# Altium footprint library TitansLib.PcbLib: 333 footprints (part 3 of 21)
Each footprint in its own frame and in the unit in brackets; x right, y up, seen from the top. Pads: shape width x height; smd on the part's side, far side on the other; paste and mask are expansions set on the pad; w line width, h text height; cw(c..) or ccw(c..) is an arc to the next point about the centre after c.
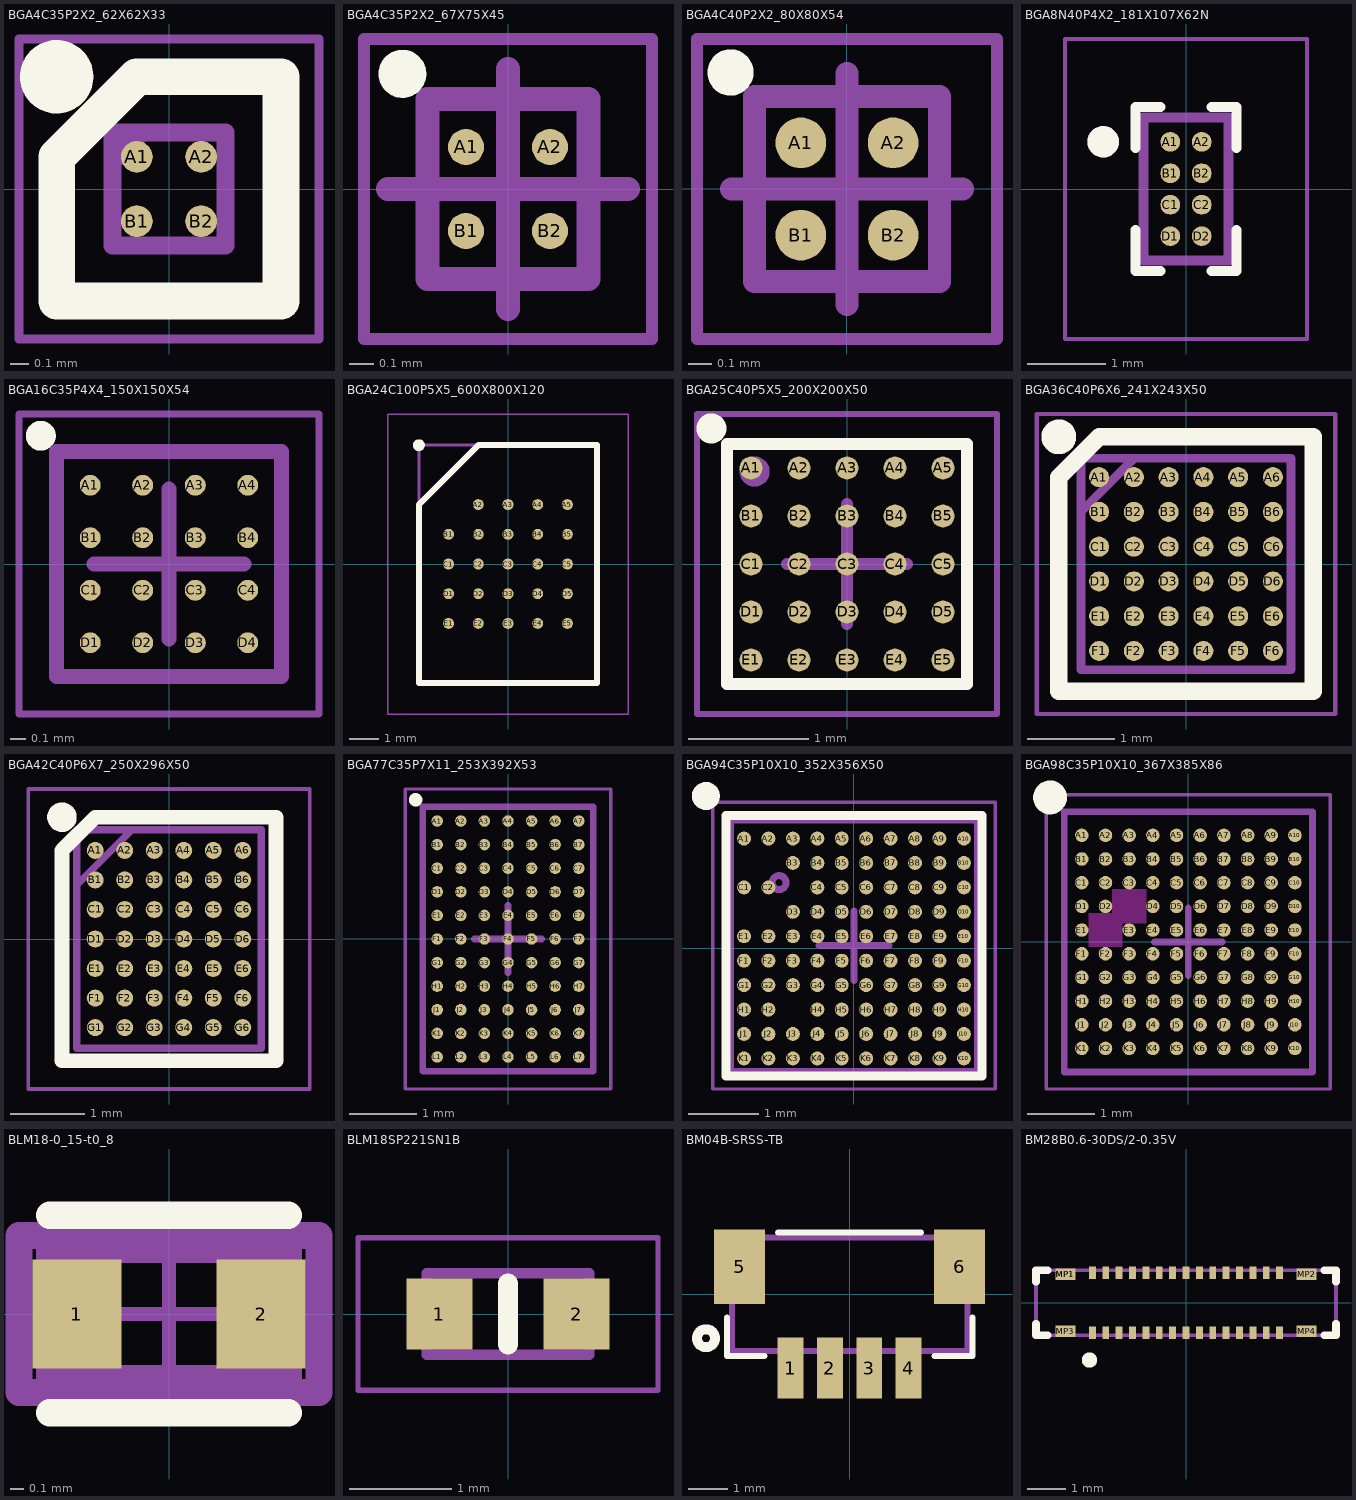
[diagram p2: the footprints below, top view; thin cyan lines are the x and y axes]

## BGA4C35P2X2_62X62X33 [mm]
pads (4):
  round 0.173 smd: A1(-0.175,0.175) A2(0.175,0.175) B1(-0.175,-0.175) B2(0.175,-0.175)
Top Overlay:
  circle w0.2: c-0.612,0.612 r0.1
  lines w0.2: -0.176,0.611 -0.612,0.175 -0.612,-0.611 0.611,-0.611 0.611,0.612 -0.175,0.612
Bottom Assembly:
  lines w0.05: -0.818,-0.818 0.818,-0.818 0.818,0.818 -0.818,0.818 -0.818,-0.818
Mechanical 15:
  lines w0.1: -0.308,0.149 -0.149,0.308 ; -0.308,-0.308 0.308,-0.308 0.308,0.308 -0.308,0.308 -0.308,-0.308

## BGA4C35P2X2_67X75X45 [mm] "BGA, 4-Leads, Body 0.67x0.75mmx0.45mm, Pitch 0.35mm"
height 0.45
pads (4):
  round 0.15 smd mask+0.05: A1(-0.175,0.175) A2(0.175,0.175) B1(-0.175,-0.175) B2(0.175,-0.175)
Top Overlay:
  circle w0.1: c-0.44,0.48 r0.05
Top Courtyard:
  lines w0.05: -0.6,-0.625 -0.6,0.625 0.6,0.625 0.6,-0.625 -0.6,-0.625
  lines w0.1: -0.5,0 0.5,0 ; 0,-0.5 0,0.5
Top Assembly:
  lines w0.1: -0.335,-0.375 -0.335,0.375 0.335,0.375 0.335,-0.375 -0.335,-0.375
3D body "BGA4C35P2X2_67X75X45.step": height 0.45, standoff 0, extent -0.335,-0.375 0.335,0.375

## BGA4C40P2X2_80X80X54 [mm] "BGA, 4-Leads, Body 0.80x0.80mmx0.54mm, Pitch 0.40mm"
height 0.54
pads (4):
  round 0.22 smd mask+0.05: A1(-0.2,0.2) A2(0.2,0.2) B1(-0.2,-0.2) B2(0.2,-0.2)
Top Overlay:
  circle w0.1: c-0.505,0.505 r0.05
Mechanical 13:
  lines w0.1: -0.4,-0.4 0.4,-0.4 0.4,0.4 -0.4,0.4 -0.4,-0.4
Mechanical 15:
  lines w0.05: -0.65,-0.65 0.65,-0.65 0.65,0.65 -0.65,0.65 -0.65,-0.65
  lines w0.1: -0.5,0 0.5,0 ; 0,-0.5 0,0.5
3D body "BGA4C40P2X2_80X80X54_.step": height 0.54, standoff 0, extent -0.4,-0.4 0.4,0.4

## BGA8N40P4X2_181X107X62N [mm]
pads (8):
  round 0.25 smd: A1(-0.2,0.6) A2(0.2,0.6) B1(-0.2,0.2) B2(0.2,0.2) C1(-0.2,-0.2) C2(0.2,-0.2) D1(-0.2,-0.6) D2(0.2,-0.6)
Top Overlay:
  circle w0.2: c-1.053,0.6 r0.1
  lines w0.127: -0.645,-0.523 -0.645,-1.045 -0.323,-1.045 ; -0.645,0.523 -0.645,1.045 -0.323,1.045 ; 0.323,-1.045 0.645,-1.045 0.645,-0.523 ; 0.323,1.045 0.645,1.045 0.645,0.523
Mechanical 13:
  circle w0.2: c-1.053,0.6 r0.1
  lines w0.127: -0.538,-0.907 0.538,-0.907 0.538,0.907 -0.538,0.907 -0.538,-0.907
Mechanical 15:
  lines w0.05: -1.538,-1.907 1.538,-1.907 1.538,1.907 -1.538,1.907 -1.538,-1.907

## BGA16C35P4X4_150X150X54 [mm] "BGA, 16-Leads, Body 1.50x1.50mmx0.54mm, Pitch 0.35mm"
height 0.54
pads (16):
  round 0.14 smd mask+0.05: A1(-0.525,0.525) A2(-0.175,0.525) A3(0.175,0.525) A4(0.525,0.525) B1(-0.525,0.175) B2(-0.175,0.175) B3(0.175,0.175) B4(0.525,0.175) C1(-0.525,-0.175) C2(-0.175,-0.175) C3(0.175,-0.175) C4(0.525,-0.175) D1(-0.525,-0.525) D2(-0.175,-0.525) D3(0.175,-0.525) D4(0.525,-0.525)
Top Overlay:
  circle w0.1: c-0.855,0.855 r0.05
Top Courtyard:
  lines w0.05: -1,-1 -1,1 1,1 1,-1 -1,-1
  lines w0.1: -0.5,0 0.5,0 ; 0,-0.5 0,0.5
Top Assembly:
  lines w0.1: -0.75,-0.75 -0.75,0.75 0.75,0.75 0.75,-0.75 -0.75,-0.75
3D body "BGA16C35P4X4_150X150X54.step": height 0.54, standoff 0, extent -0.75,-0.75 0.75,0.75

## BGA24C100P5X5_600X800X120 [mm]
pads (24):
  round 0.37 smd: A2(-1,2) A3(0,2) A4(1,2) A5(2,2) B1(-2,1) B2(-1,1) B3(0,1) B4(1,1) B5(2,1) C1(-2,0) C2(-1,0) C3(0,0) C4(1,0) C5(2,0) D1(-2,-1) D2(-1,-1) D3(0,-1) D4(1,-1) D5(2,-1) E1(-2,-2) E2(-1,-2) E3(0,-2) E4(1,-2) E5(2,-2)
Top Overlay:
  circle w0.2: c-3,4 r0.1
  lines w0.2: -3,-4 -3,2 -1,4 3,4 3,-4 -3,-4
Bottom Assembly:
  lines w0.05: -4.05,-5.05 -4.05,5.05 4.05,5.05 4.05,-5.05 -4.05,-5.05
Mechanical 15:
  lines w0.1: -3,1.975 -0.975,4 ; -3,-4 -3,4 3,4 3,-4 -3,-4
3D body "APS51208N-OBR-BD.stp": height 1.2, standoff 0, extent -3,-4 3,4

## BGA25C40P5X5_200X200X50 [mm]
pads (25):
  round 0.193 smd mask+0.05: A1(-0.8,0.8) A2(-0.4,0.8) A3(0,0.8) A4(0.4,0.8) A5(0.8,0.8) B1(-0.8,0.4) B2(-0.4,0.4) B3(0,0.4) B4(0.4,0.4) B5(0.8,0.4) C1(-0.8,0) C2(-0.4,0) C3(0,0) C4(0.4,0) C5(0.8,0) D1(-0.8,-0.4) D2(-0.4,-0.4) D3(0,-0.4) D4(0.4,-0.4) D5(0.8,-0.4) E1(-0.8,-0.8) E2(-0.4,-0.8) E3(0,-0.8) E4(0.4,-0.8) E5(0.8,-0.8)
Top Overlay:
  circle w0.15: c-1.13,1.13 r0.05
  lines w0.1: -1,-1 1,-1 1,1 -1,1 -1,-1
Mechanical 7:
  circle w0.15: c-0.77,0.77 r0.05
  lines w0.1: -1,-1 -1,1 1,1 1,-1 -1,-1
Mechanical 15:
  lines w0.05: -1.25,-1.25 1.25,-1.25 1.25,1.25 -1.25,1.25 -1.25,-1.25
  lines w0.1: -0.5,0 0.5,0 ; 0,-0.5 0,0.5
3D body "BGA25C40P5X5_200X200X50.step": height 0.5, standoff 0, extent -1,-1 1,1

## BGA36C40P6X6_241X243X50 [mm]
pads (36):
  round 0.23 smd mask+0.05: A1(-1,1) A2(-0.6,1) A3(-0.2,1) A4(0.2,1) A5(0.6,1) A6(1,1) B1(-1,0.6) B2(-0.6,0.6) B3(-0.2,0.6) B4(0.2,0.6) B5(0.6,0.6) B6(1,0.6) C1(-1,0.2) C2(-0.6,0.2) C3(-0.2,0.2) C4(0.2,0.2) C5(0.6,0.2) C6(1,0.2) D1(-1,-0.2) D2(-0.6,-0.2) D3(-0.2,-0.2) D4(0.2,-0.2) D5(0.6,-0.2) D6(1,-0.2) E1(-1,-0.6) E2(-0.6,-0.6) E3(-0.2,-0.6) E4(0.2,-0.6) E5(0.6,-0.6) E6(1,-0.6) F1(-1,-1) F2(-0.6,-1) F3(-0.2,-1) F4(0.2,-1) F5(0.6,-1) F6(1,-1)
Top Overlay:
  circle w0.2: c-1.463,1.463 r0.1
  lines w0.2: -1.463,-1.463 -1.463,1 -1,1.463 1.463,1.463 1.463,-1.463 -1.463,-1.463
Top Courtyard:
  lines w0.05: -1.717,-1.725 -1.717,1.726 1.717,1.726 1.717,-1.725 -1.717,-1.725
Mechanical 15:
  lines w0.1: -1.207,0.603 -0.594,1.216 ; -1.207,-1.215 -1.207,1.216 1.207,1.216 1.207,-1.215 -1.207,-1.215
3D body "TAS2562YFPR.stp": height 0.5, standoff 0, extent -1.208,-1.215 1.206,1.216

## BGA42C40P6X7_250X296X50 [mm]
pads (42):
  round 0.23 smd mask+0.05: A1(-1,1.2) A2(-0.6,1.2) A3(-0.2,1.2) A4(0.2,1.2) A5(0.6,1.2) A6(1,1.2) B1(-1,0.8) B2(-0.6,0.8) B3(-0.2,0.8) B4(0.2,0.8) B5(0.6,0.8) B6(1,0.8) C1(-1,0.4) C2(-0.6,0.4) C3(-0.2,0.4) C4(0.2,0.4) C5(0.6,0.4) C6(1,0.4) D1(-1,0) D2(-0.6,0) D3(-0.2,0) D4(0.2,0) D5(0.6,0) D6(1,0) E1(-1,-0.4) E2(-0.6,-0.4) E3(-0.2,-0.4) E4(0.2,-0.4) E5(0.6,-0.4) E6(1,-0.4) F1(-1,-0.8) F2(-0.6,-0.8) F3(-0.2,-0.8) F4(0.2,-0.8) F5(0.6,-0.8) F6(1,-0.8) G1(-1,-1.2) G2(-0.6,-1.2) G3(-0.2,-1.2) G4(0.2,-1.2) G5(0.6,-1.2) G6(1,-1.2)
Top Overlay:
  circle w0.2: c-1.45,1.65 r0.1
  lines w0.2: -1.45,-1.65 -1.45,1.2 -1,1.65 1.45,1.65 1.45,-1.65 -1.45,-1.65
Top Courtyard:
  lines w0.05: -1.905,-2.032 1.905,-2.032 1.905,2.032 -1.905,2.032 -1.905,-2.032
Mechanical 15:
  lines w0.1: -1.249,0.732 -0.502,1.479 ; -1.249,-1.479 -1.249,1.478 1.249,1.478 1.249,-1.479 -1.249,-1.479
3D body "TAS2563YBGR.stp": height 0.5, standoff 0, extent -1.249,-1.479 1.249,1.479

## BGA77C35P7X11_253X392X53 [mm] "BGA, 77-Leads, Body 2.53x3.92mmx0.53mm, Pitch 0.35mm"
height 0.53
pads (77):
  round 0.17 smd mask+0.05: A1(-1.05,1.75) A2(-0.7,1.75) A3(-0.35,1.75) A4(0,1.75) A5(0.35,1.75) A6(0.7,1.75) A7(1.05,1.75) B1(-1.05,1.4) B2(-0.7,1.4) B3(-0.35,1.4) B4(0,1.4) B5(0.35,1.4) B6(0.7,1.4) B7(1.05,1.4) C1(-1.05,1.05) C2(-0.7,1.05) C3(-0.35,1.05) C4(0,1.05) C5(0.35,1.05) C6(0.7,1.05) C7(1.05,1.05) D1(-1.05,0.7) D2(-0.7,0.7) D3(-0.35,0.7) D4(0,0.7) D5(0.35,0.7) D6(0.7,0.7) D7(1.05,0.7) E1(-1.05,0.35) E2(-0.7,0.35) E3(-0.35,0.35) E4(0,0.35) E5(0.35,0.35) E6(0.7,0.35) E7(1.05,0.35) F1(-1.05,0) F2(-0.7,0) F3(-0.35,0) F4(0,0) F5(0.35,0) F6(0.7,0) F7(1.05,0) G1(-1.05,-0.35) G2(-0.7,-0.35) G3(-0.35,-0.35) G4(0,-0.35) G5(0.35,-0.35) G6(0.7,-0.35) G7(1.05,-0.35) H1(-1.05,-0.7) H2(-0.7,-0.7) H3(-0.35,-0.7) H4(0,-0.7) H5(0.35,-0.7) H6(0.7,-0.7) H7(1.05,-0.7) J1(-1.05,-1.05) J2(-0.7,-1.05) J3(-0.35,-1.05) J4(0,-1.05) J5(0.35,-1.05) J6(0.7,-1.05) J7(1.05,-1.05) K1(-1.05,-1.4) K2(-0.7,-1.4) K3(-0.35,-1.4) K4(0,-1.4) K5(0.35,-1.4) K6(0.7,-1.4) K7(1.05,-1.4) L1(-1.05,-1.75) L2(-0.7,-1.75) L3(-0.35,-1.75) L4(0,-1.75) L5(0.35,-1.75) L6(0.7,-1.75) L7(1.05,-1.75)
Top Overlay:
  circle w0.1: c-1.37,2.065 r0.05
Mechanical 13:
  lines w0.1: -1.265,-1.96 1.265,-1.96 1.265,1.96 -1.265,1.96 -1.265,-1.96
Mechanical 15:
  lines w0.05: -1.525,-2.225 1.525,-2.225 1.525,2.225 -1.525,2.225 -1.525,-2.225
  lines w0.1: -0.5,0 0.5,0 ; 0,-0.5 0,0.5
3D body "BGA77C35P7X11_253X392X53.step": height 0.53, standoff 0, extent -1.265,-1.96 1.265,1.96

## BGA94C35P10X10_352X356X50 [mm]
pads (94):
  round 0.2 smd mask+0.04: A1(-1.575,1.575) A2(-1.225,1.575) A3(-0.875,1.575) A4(-0.525,1.575) A5(-0.175,1.575) A6(0.175,1.575) A7(0.525,1.575) A8(0.875,1.575) A9(1.225,1.575) A10(1.575,1.575) B3(-0.875,1.225) B4(-0.525,1.225) B5(-0.175,1.225) B6(0.175,1.225) B7(0.525,1.225) B8(0.875,1.225) B9(1.225,1.225) B10(1.575,1.225) C1(-1.575,0.875) C2(-1.225,0.875) C4(-0.525,0.875) C5(-0.175,0.875) C6(0.175,0.875) C7(0.525,0.875) C8(0.875,0.875) C9(1.225,0.875) C10(1.575,0.875) D3(-0.875,0.525) D4(-0.525,0.525) D5(-0.175,0.525) D6(0.175,0.525) D7(0.525,0.525) D8(0.875,0.525) D9(1.225,0.525) D10(1.575,0.525) E1(-1.575,0.175) E2(-1.225,0.175) E3(-0.875,0.175) E4(-0.525,0.175) E5(-0.175,0.175) E6(0.175,0.175) E7(0.525,0.175) E8(0.875,0.175) E9(1.225,0.175) E10(1.575,0.175) F1(-1.575,-0.175) F2(-1.225,-0.175) F3(-0.875,-0.175) F4(-0.525,-0.175) F5(-0.175,-0.175) F6(0.175,-0.175) F7(0.525,-0.175) F8(0.875,-0.175) F9(1.225,-0.175) F10(1.575,-0.175) G1(-1.575,-0.525) G2(-1.225,-0.525) G3(-0.875,-0.525) G4(-0.525,-0.525) G5(-0.175,-0.525) G6(0.175,-0.525) G7(0.525,-0.525) G8(0.875,-0.525) G9(1.225,-0.525) G10(1.575,-0.525) H1(-1.575,-0.875) H2(-1.225,-0.875) H4(-0.525,-0.875) H5(-0.175,-0.875) H6(0.175,-0.875) H7(0.525,-0.875) H8(0.875,-0.875) H9(1.225,-0.875) H10(1.575,-0.875) J1(-1.575,-1.225) J2(-1.225,-1.225) J3(-0.875,-1.225) J4(-0.525,-1.225) J5(-0.175,-1.225) J6(0.175,-1.225) J7(0.525,-1.225) J8(0.875,-1.225) J9(1.225,-1.225) J10(1.575,-1.225) K1(-1.575,-1.575) K2(-1.225,-1.575) K3(-0.875,-1.575) K4(-0.525,-1.575) K5(-0.175,-1.575) K6(0.175,-1.575) K7(0.525,-1.575) K8(0.875,-1.575) K9(1.225,-1.575) K10(1.575,-1.575)
Top Overlay:
  circle w0.2: c-2.122,2.184 r0.1
  lines w0.125: -1.834,-1.826 1.835,-1.826 1.835,1.906 -1.834,1.906 -1.834,-1.826
Mechanical 7:
  circle w0.1: c-1.072,0.944 r0.1
  lines w0.1: -1.772,-1.763 -1.772,1.844 1.772,1.844 1.772,-1.763 -1.772,-1.763
Mechanical 15:
  lines w0.05: -2.022,-2.013 -2.022,2.094 2.022,2.094 2.022,-2.013 -2.022,-2.013
  lines w0.1: -0.5,0.04 0.5,0.04 ; 0,-0.46 0,0.54
3D body "Graviton CSP.step": height 0.47, standoff 0, extent -1.772,-1.763 1.772,1.844

## BGA98C35P10X10_367X385X86 [mm] "BGA, 98-Leads, Body 3.67x3.85mmx0.86mm, Pitch 0.35mm"
height 0.86
pads (98):
  round 0.2 smd: A1(-1.575,1.575) A2(-1.225,1.575) A3(-0.875,1.575) A4(-0.525,1.575) A5(-0.175,1.575) A6(0.175,1.575) A7(0.525,1.575) A8(0.875,1.575) A9(1.225,1.575) A10(1.575,1.575) B1(-1.575,1.225) B2(-1.225,1.225) B3(-0.875,1.225) B4(-0.525,1.225) B5(-0.175,1.225) B6(0.175,1.225) B7(0.525,1.225) B8(0.875,1.225) B9(1.225,1.225) B10(1.575,1.225) C1(-1.575,0.875) C2(-1.225,0.875) C3(-0.875,0.875) C4(-0.525,0.875) C5(-0.175,0.875) C6(0.175,0.875) C7(0.525,0.875) C8(0.875,0.875) C9(1.225,0.875) C10(1.575,0.875) D1(-1.575,0.525) D2(-1.225,0.525) D4(-0.525,0.525) D5(-0.175,0.525) D6(0.175,0.525) D7(0.525,0.525) D8(0.875,0.525) D9(1.225,0.525) D10(1.575,0.525) E1(-1.575,0.175) E3(-0.875,0.175) E4(-0.525,0.175) E5(-0.175,0.175) E6(0.175,0.175) E7(0.525,0.175) E8(0.875,0.175) E9(1.225,0.175) E10(1.575,0.175) F1(-1.575,-0.175) F2(-1.225,-0.175) F3(-0.875,-0.175) F4(-0.525,-0.175) F5(-0.175,-0.175) F6(0.175,-0.175) F7(0.525,-0.175) F8(0.875,-0.175) F9(1.225,-0.175) F10(1.575,-0.175) G1(-1.575,-0.525) G2(-1.225,-0.525) G3(-0.875,-0.525) G4(-0.525,-0.525) G5(-0.175,-0.525) G6(0.175,-0.525) G7(0.525,-0.525) G8(0.875,-0.525) G9(1.225,-0.525) G10(1.575,-0.525) H1(-1.575,-0.875) H2(-1.225,-0.875) H3(-0.875,-0.875) H4(-0.525,-0.875) H5(-0.175,-0.875) H6(0.175,-0.875) H7(0.525,-0.875) H8(0.875,-0.875) H9(1.225,-0.875) H10(1.575,-0.875) J1(-1.575,-1.225) J2(-1.225,-1.225) J3(-0.875,-1.225) J4(-0.525,-1.225) J5(-0.175,-1.225) J6(0.175,-1.225) J7(0.525,-1.225) J8(0.875,-1.225) J9(1.225,-1.225) J10(1.575,-1.225) K1(-1.575,-1.575) K2(-1.225,-1.575) K3(-0.875,-1.575) K4(-0.525,-1.575) K5(-0.175,-1.575) K6(0.175,-1.575) K7(0.525,-1.575) K8(0.875,-1.575) K9(1.225,-1.575) K10(1.575,-1.575)
Top Layer keep-out:
  region: -1.125,0.775 -0.625,0.775 -0.625,0.275 -1.125,0.275
  region: -1.475,0.425 -0.975,0.425 -0.975,-0.075 -1.475,-0.075
Top Overlay:
  circle w0.25: c-2.045,2.135 r0.125
Mechanical 7:
  lines w0.1: -1.835,-1.925 -1.835,1.925 1.835,1.925 1.835,-1.925 -1.835,-1.925
Mechanical 15:
  lines w0.05: -2.1,-2.175 -2.1,2.175 2.1,2.175 2.1,-2.175 -2.1,-2.175
  lines w0.1: -0.5,0 0.5,0 ; 0,-0.5 0,0.5
3D body "BGA98C35P10X10_367X385X86.step": height 0.86, standoff 0, extent -1.835,-1.925 1.835,1.925

## BLM18-0_15-t0_8 [mm]
pads (2):
  rect 0.65x0.8 smd paste+0 mask+0.05: 1(-0.675,0) 2(0.675,0)
Top Overlay:
  lines w0.2: -0.875,-0.725 0.875,-0.725 ; -0.875,0.725 0.875,0.725
Top 3D Body:
  lines w0.2: -0.875,-0.475 0.875,-0.475 0.875,0.475 -0.875,0.475 -0.875,-0.475
Top Courtyard:
  lines w0.2: -1.1,-0.575 1.1,-0.575 1.1,0.575 -1.1,0.575 -1.1,-0.575
Top Component Center:
  lines w0.1: -0.5,0 0.5,0 ; 0,-0.5 0,0.5
Top Assembly:
  lines w0.2: -1.1,-0.575 1.1,-0.575 1.1,0.575 -1.1,0.575 -1.1,-0.575
  text ".Designator" at -0.875,-0.287 h1
3D body "FBead_Murata_BLM18EG221SN1D_eec.STEP": height 0.25, standoff 0, extent -1.1,-0.575 1.1,0.575

## BLM18SP221SN1B [mm]
pads (2):
  rect 0.65x0.7 smd: 1(-0.675,0) 2(0.675,0)
Top Overlay:
  lines w0.2: 0,-0.3 0,0.3
Mechanical 13:
  lines w0.1: -0.8,-0.4 -0.8,0.4 0.8,0.4 0.8,-0.4 -0.8,-0.4
Mechanical 15:
  lines w0.05: -1.475,-0.75 -1.475,0.75 1.475,0.75 1.475,-0.75 -1.475,-0.75
3D body "BLM18SP221SZ1D.stp": height 0.8, standoff 0, extent -0.8,-0.4 0.8,0.4

## BM04B-SRSS-TB [mil] "Connector Header Surface Mount 4 position 0.039\" (1.00mm)"
pads (6):
  rect 26x61 smd: 1(-59.06,-74.1) 2(-19.68,-74.1) 3(19.68,-74.1) 4(59.06,-74.1)
  rect 51x75 smd: 5(-110.24,27.47) 6(110.24,27.47)
Top Overlay:
  lines w6: -123,-23.13 -123,-62 -85.15,-62 ; -71.64,62 71.64,62 ; 85.15,-62 123,-62 123,-23.13
  lines w10: -153,-44.1 ccw(c-144,-44.1) -135,-44.1 ccw(c-144,-44.1) -153,-44.1
Mechanical 13:
  lines w6: -118,-57 118,-57 118,57 -118,57 -118,-57
3D body "step_temp.STEP": height 171.26, standoff 0, extent -118.11,-84.65 118.11,57.09

## BM28B0.6-30DS/2-0.35V [mm]
pads (35):
  rect 0.18x0.33 smd mask+0.025: 1(-2.45,-0.785) 2(-2.45,0.785) 3(-2.1,-0.785) 4(-2.1,0.785) 5(-1.75,-0.785) 6(-1.75,0.785) 7(-1.4,-0.785) 8(-1.4,0.785) 9(-1.05,-0.785) 10(-1.05,0.785) 11(-0.7,-0.785) 12(-0.7,0.785) 13(-0.35,-0.785) 14(-0.35,0.785) 15(0,-0.785) 16(0,0.785) 17(0.35,-0.785) 18(0.35,0.785) 19(0.7,-0.785) 20(0.7,0.785) 21(1.05,-0.785) 22(1.05,0.785) 23(1.4,-0.785) 24(1.4,0.785) 25(1.75,-0.785) 26(1.75,0.785) 27(2.1,-0.785) 28(2.1,0.785) 29(2.45,-0.785) 30(2.45,0.785)
  rect 0.53x0.31 smd mask+0.025: MP1(-3.155,0.745) MP1(-3.155,0.745) MP2(3.155,0.745) MP3(-3.155,-0.745) MP4(3.155,-0.745)
Top Overlay:
  circle w0.2: c-2.525,-1.5 r0.1
  lines w0.2: -3.925,-0.55 -3.925,-0.85 -3.625,-0.85 ; -3.925,0.55 -3.925,0.85 -3.625,0.85 ; 3.625,-0.85 3.925,-0.85 3.925,-0.55 ; 3.625,0.85 3.925,0.85 3.925,0.55
Top Courtyard:
  lines w0.1: -3.925,-0.85 -3.925,0.85 3.925,0.85 3.925,-0.85 -3.925,-0.85
Top Designator:
  text ".Designator" at -4.818,-0.133 h2.5
3D body "BM28-30DS.stp": height 0.6, standoff 0, extent -3.925,-0.85 3.925,0.85